# Altium footprint library IndoorGuide_Tag_Device_V1.0.0.PcbLib: 7 footprints
Each footprint in its own frame and in the unit in brackets; x right, y up, seen from the top. Pads: shape width x height; smd on the part's side, far side on the other; paste and mask are expansions set on the pad; w line width, h text height; cw(c..) or ccw(c..) is an arc to the next point about the centre after c.
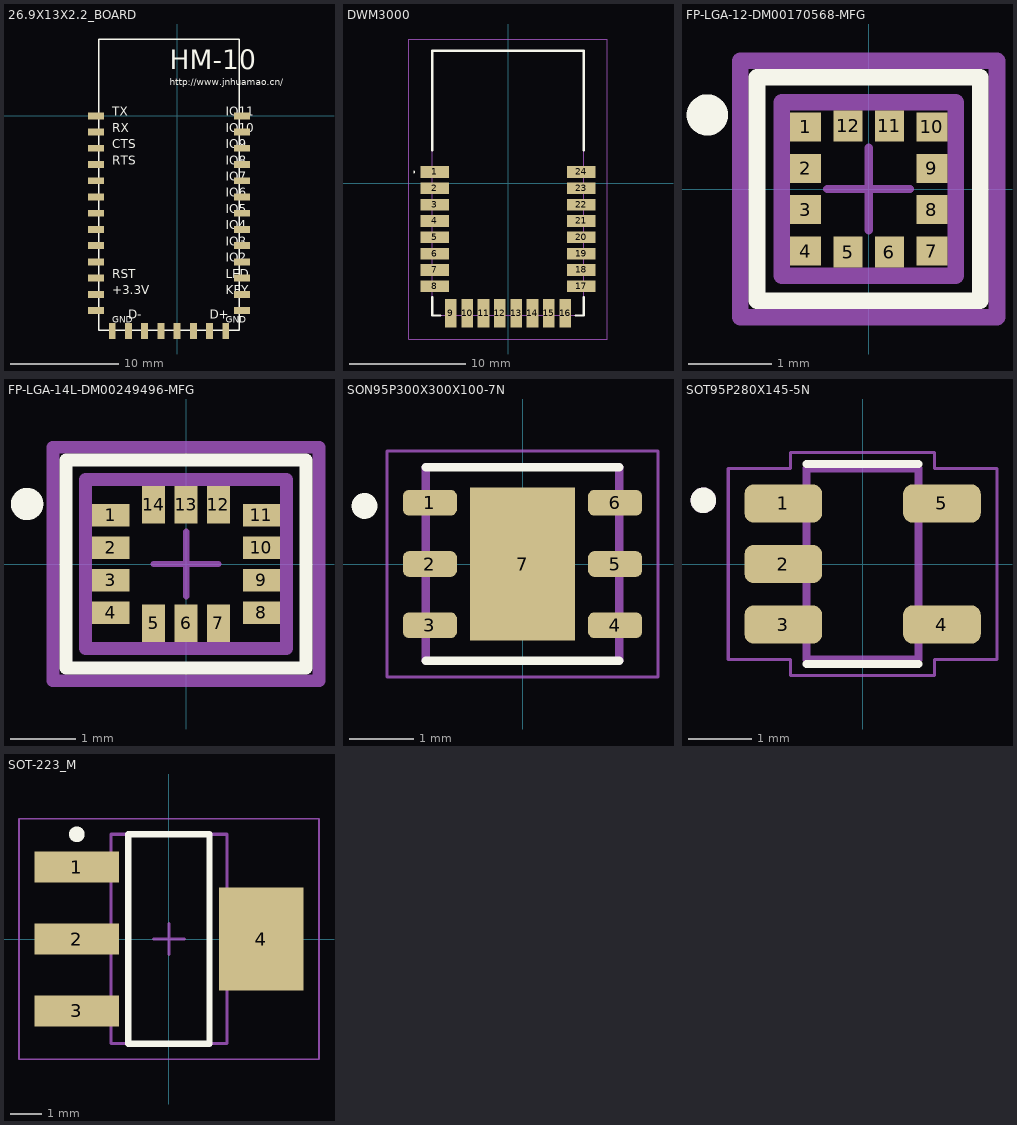
[diagram p0: the footprints below, top view; thin cyan lines are the x and y axes]

## 26.9X13X2.2_BOARD [mm]
pads (34):
  rect 1.5x0.635 smd: 1(-7.5,0) 2(-7.5,-1.5) 3(-7.5,-3) 4(-7.5,-4.5) 5(-7.5,-6) 6(-7.5,-7.5) 8(-7.5,-10.5) 9(-7.5,-12) 10(-7.5,-13.5) 11(-7.5,-15) 12(-7.5,-16.5) 13(-7.5,-18) 22(6,-18) 23(6,-16.5) 24(6,-15) 25(6,-13.5) 26(6,-12) 27(6,-10.5) 28(6,-9) 29(6,-7.5) 30(6,-6) 31(6,-4.5) 32(6,-3) 33(6,-1.5) 34(6,0) $7(-7.5,-9)
  rect 0.635x1.5 smd: 14(-6,-19.875) 15(-4.5,-19.875) 16(-3,-19.875) 17(-1.5,-19.875) 18(0,-19.875) 19(1.5,-19.875) 20(3,-19.875) 21(4.5,-19.875)
Top Overlay:
  lines w0.127: -7.25,-19.8 -7.25,7.1 5.75,7.1 5.75,-19.8 -7.25,-19.8
  text "HM-10" at -0.69,4.32 h1.78
  text "IO11" at 4.5,0 h0.81
  text "IO10" at 4.5,-1.5 h0.81
  text "IO9" at 4.5,-3 h0.81
  text "IO8" at 4.5,-4.5 h0.81
  text "IO7" at 4.5,-6 h0.81
  text "IO6" at 4.5,-7.5 h0.81
  text "IO5" at 4.5,-9 h0.81
  text "IO4" at 4.5,-10.5 h0.81
  text "IO3" at 4.5,-12 h0.81
  text "IO2" at 4.5,-13.5 h0.81
  text "LED" at 4.5,-15 h0.81
  text "KEY" at 4.5,-16.5 h0.81
  text "GND" at 4.5,-19.125 h0.61
  text "D+" at 3,-18.75 h0.81
  text "D-" at -4.5,-18.75 h0.81
  text "GND" at -6,-19.125 h0.61
  text "+3.3V" at -6,-16.5 h0.81
  text "RST" at -6,-15 h0.81
  text "RTS" at -6,-4.5 h0.81
  text "CTS" at -6,-3 h0.81
  text "RX" at -6,-1.5 h0.81
  text "TX" at -6,0 h0.81
  text "http://www.jnhuamao.cn/" at -0.69,2.82 h0.61
3D body "step_temp.STEP": height 2.2, standoff 0, extent -6.5,-13.45 6.5,13.45

## DWM3000 [mm]
pads (24):
  rect 2.45x1 smd: 1(-6.295,0.95) 2(-6.295,-0.45) 3(-6.295,-1.85) 4(-6.295,-3.25) 5(-6.295,-4.65) 6(-6.295,-6.05) 7(-6.295,-7.45) 8(-6.295,-8.85) 17(6.295,-8.85) 18(6.295,-7.45) 19(6.295,-6.05) 20(6.295,-4.65) 21(6.295,-3.25) 22(6.295,-1.85) 23(6.295,-0.45) 24(6.295,0.95)
  rect 1x2.45 smd: 9(-4.9,-11.145) 10(-3.5,-11.145) 11(-2.1,-11.145) 12(-0.7,-11.145) 13(0.7,-11.145) 14(2.1,-11.145) 15(3.5,-11.145) 16(4.9,-11.145)
Top Overlay:
  lines w0.1: -8.1,0.95 ccw(c-8.05,0.95) -8,0.95 ccw(c-8.05,0.95) -8.1,0.95
  lines w0.2: -6.5,-9.8 -6.5,-11.35 -5.8,-11.35 ; -6.5,2.8 -6.5,11.35 6.5,11.35 6.5,2.8 ; 5.8,-11.35 6.5,-11.35 6.5,-9.8
Mechanical 15:
  lines w0.1: -6.5,-11.35 -6.5,11.35 6.5,11.35 6.5,-11.35 -6.5,-11.35
Mechanical 20:
  lines w0.1: -8.52,-13.37 -8.52,12.35 8.52,12.35 8.52,-13.37 -8.52,-13.37

## FP-LGA-12-DM00170568-MFG [mm]
pads (12):
  rect 0.375x0.35 smd paste+0 mask+0: 1(-0.763,0.75) 2(-0.763,0.25) 3(-0.763,-0.25) 4(-0.763,-0.75) 7(0.763,-0.75) 8(0.763,-0.25) 9(0.763,0.25) 10(0.763,0.75)
  rect 0.35x0.375 smd paste+0 mask+0: 5(-0.25,-0.763) 6(0.25,-0.763) 11(0.25,0.763) 12(-0.25,0.763)
Top Overlay:
  circle w0.25: c-1.95,0.895 r0.125
  lines w0.2: -1.35,-1.35 1.35,-1.35 1.35,1.35 -1.35,1.35 -1.35,-1.35
Top 3D Body:
  lines w0.2: -1.05,-1.05 1.05,-1.05 1.05,1.05 -1.05,1.05 -1.05,-1.05
Top Courtyard:
  lines w0.2: -1.55,-1.55 1.55,-1.55 1.55,1.55 -1.55,1.55 -1.55,-1.55
Top Assembly:
  lines w0.2: -1.55,-1.55 1.55,-1.55 1.55,1.55 -1.55,1.55 -1.55,-1.55
  text ".Designator" at 0,0.188 h1
Top Component Center:
  lines w0.1: -0.5,0 0.5,0 ; 0,-0.5 0,0.5
3D body "IC_STMicroelectronics_LIS2MDLTR_eec.STEP": height 0.25, standoff 0, extent -1.55,-1.55 1.55,1.55

## FP-LGA-14L-DM00249496-MFG [mm]
pads (14):
  rect 0.575x0.35 smd paste-1000 mask+0: 1(-1.162,0.75) 2(-1.162,0.25) 3(-1.162,-0.25) 4(-1.162,-0.75) 8(1.162,-0.75) 9(1.162,-0.25) 10(1.162,0.25) 11(1.162,0.75)
  rect 0.35x0.575 smd paste-1000 mask+0: 5(-0.5,-0.913) 6(0,-0.913) 7(0.5,-0.913) 12(0.5,0.913) 13(0,0.913) 14(-0.5,0.913)
Top Overlay:
  circle w0.25: c-2.45,0.925 r0.125
  lines w0.2: -1.85,-1.6 1.85,-1.6 1.85,1.6 -1.85,1.6 -1.85,-1.6
Top Paste:
  rectangle: -1.427,0.598 -0.898,0.902
  rectangle: -1.427,0.098 -0.898,0.402
  rectangle: -1.427,-0.402 -0.898,-0.098
  rectangle: -1.427,-0.902 -0.898,-0.598
  rectangle: 0.898,-0.902 1.427,-0.598
  rectangle: 0.898,-0.402 1.427,-0.098
  rectangle: 0.898,0.098 1.427,0.402
  rectangle: 0.898,0.598 1.427,0.902
  rectangle: -0.652,-1.177 -0.348,-0.648
  rectangle: -0.152,-1.177 0.152,-0.648
  rectangle: 0.348,-1.177 0.652,-0.648
  rectangle: 0.348,0.648 0.652,1.177
  rectangle: -0.152,0.648 0.152,1.177
  rectangle: -0.652,0.648 -0.348,1.177
Top 3D Body:
  lines w0.2: -1.55,-1.3 1.55,-1.3 1.55,1.3 -1.55,1.3 -1.55,-1.3
Top Courtyard:
  lines w0.2: -2.05,-1.8 2.05,-1.8 2.05,1.8 -2.05,1.8 -2.05,-1.8
Top Assembly:
  lines w0.2: -2.05,-1.8 2.05,-1.8 2.05,1.8 -2.05,1.8 -2.05,-1.8
  text ".Designator" at 0,-0.001 h1
Top Component Center:
  lines w0.1: -0.5,0 0.5,0 ; 0,-0.5 0,0.5
3D body "IC_STMicroelectronics_LSM6DSRTR_eec.STEP": height 0.25, standoff 0, extent -2.05,-1.8 2.05,1.8

## SON95P300X300X100-7N [mm]
pads (7):
  rrect50% 0.84x0.4 smd: 1(-1.435,0.95) 2(-1.435,0) 3(-1.435,-0.95) 4(1.435,-0.95) 5(1.435,0) 6(1.435,0.95)
  rect 1.625x2.365 smd paste-2: 7(0,0)
Top Overlay:
  circle w0.2: c-2.45,0.9 r0.1
  lines w0.127: -1.5,-1.5 1.5,-1.5 ; -1.5,1.5 1.5,1.5
Top Paste:
  region: 0.57,-0.83 -0.57,-0.83 -0.57,0.83 0.57,0.83
Mechanical 13:
  lines w0.127: -1.5,-1.5 -1.5,1.5 ; 1.5,-1.5 1.5,1.5
Mechanical 15:
  lines w0.05: -2.1,-1.75 -2.1,1.75 2.1,1.75 2.1,-1.75 -2.1,-1.75
3D body "step_temp.STEP": height 0.54, standoff -0.46, extent -1.5,-1.5 1.5,1.5

## SOT95P280X145-5N [mm]
pads (5):
  rrect50% 1.22x0.6 smd: 1(-1.245,0.95) 2(-1.245,0) 3(-1.245,-0.95) 4(1.245,-0.95) 5(1.245,0.95)
Top Overlay:
  circle w0.2: c-2.5,1 r0.1
  lines w0.127: -0.88,-1.57 0.88,-1.57 ; -0.88,1.57 0.88,1.57
Mechanical 13:
  circle w0.2: c-2.5,1 r0.1
  lines w0.127: -0.88,-1.5 0.88,-1.5 0.88,1.5 -0.88,1.5 -0.88,-1.5
Mechanical 15:
  lines w0.05: -2.11,-1.5 -2.11,1.5 -1.13,1.5 -1.13,1.75 1.13,1.75 1.13,1.5 2.11,1.5 2.11,-1.5 1.13,-1.5 1.13,-1.75 -1.13,-1.75 -1.13,-1.5 -2.11,-1.5
3D body "step_temp.STEP": height 1.45, standoff 0, extent -1.35,-1.45 1.35,1.45

## SOT-223_M [mm] "SOT223, 4-Leads, Body 6.5x3.5mm, Pitch 2.3mm, Lead Span 7mm, IPC Low Density"
height 1.8
pads (4):
  rect 2.7x1 smd: 1(-2.95,2.3) 2(-2.95,0) 3(-2.95,-2.3)
  rect 2.7x3.3 smd: 4(2.95,0)
Top Overlay:
  circle w0.25: c-2.95,3.35 r0.125
  lines w0.2: -1.3,-3.35 -1.3,3.35 1.3,3.35 1.3,-3.35 -1.3,-3.35
Mechanical 13:
  lines w0.1: -1.85,-3.35 -1.85,3.35 1.85,3.35 1.85,-3.35 -1.85,-3.35
Mechanical 15:
  lines w0.05: -4.8,-3.85 -4.8,3.85 4.8,3.85 4.8,-3.85 -4.8,-3.85
  lines w0.1: -0.5,0 0.5,0 ; 0,-0.5 0,0.5
3D body: height 1.8, standoff 0.02, extent -1.85,-3.35 1.85,3.35